# Altium footprint library PcbLib1.PcbLib: 29 footprints (part 1 of 2)
Each footprint in its own frame and in the unit in brackets; x right, y up, seen from the top. Pads: shape width x height; smd on the part's side, far side on the other; paste and mask are expansions set on the pad; w line width, h text height; cw(c..) or ccw(c..) is an arc to the next point about the centre after c.
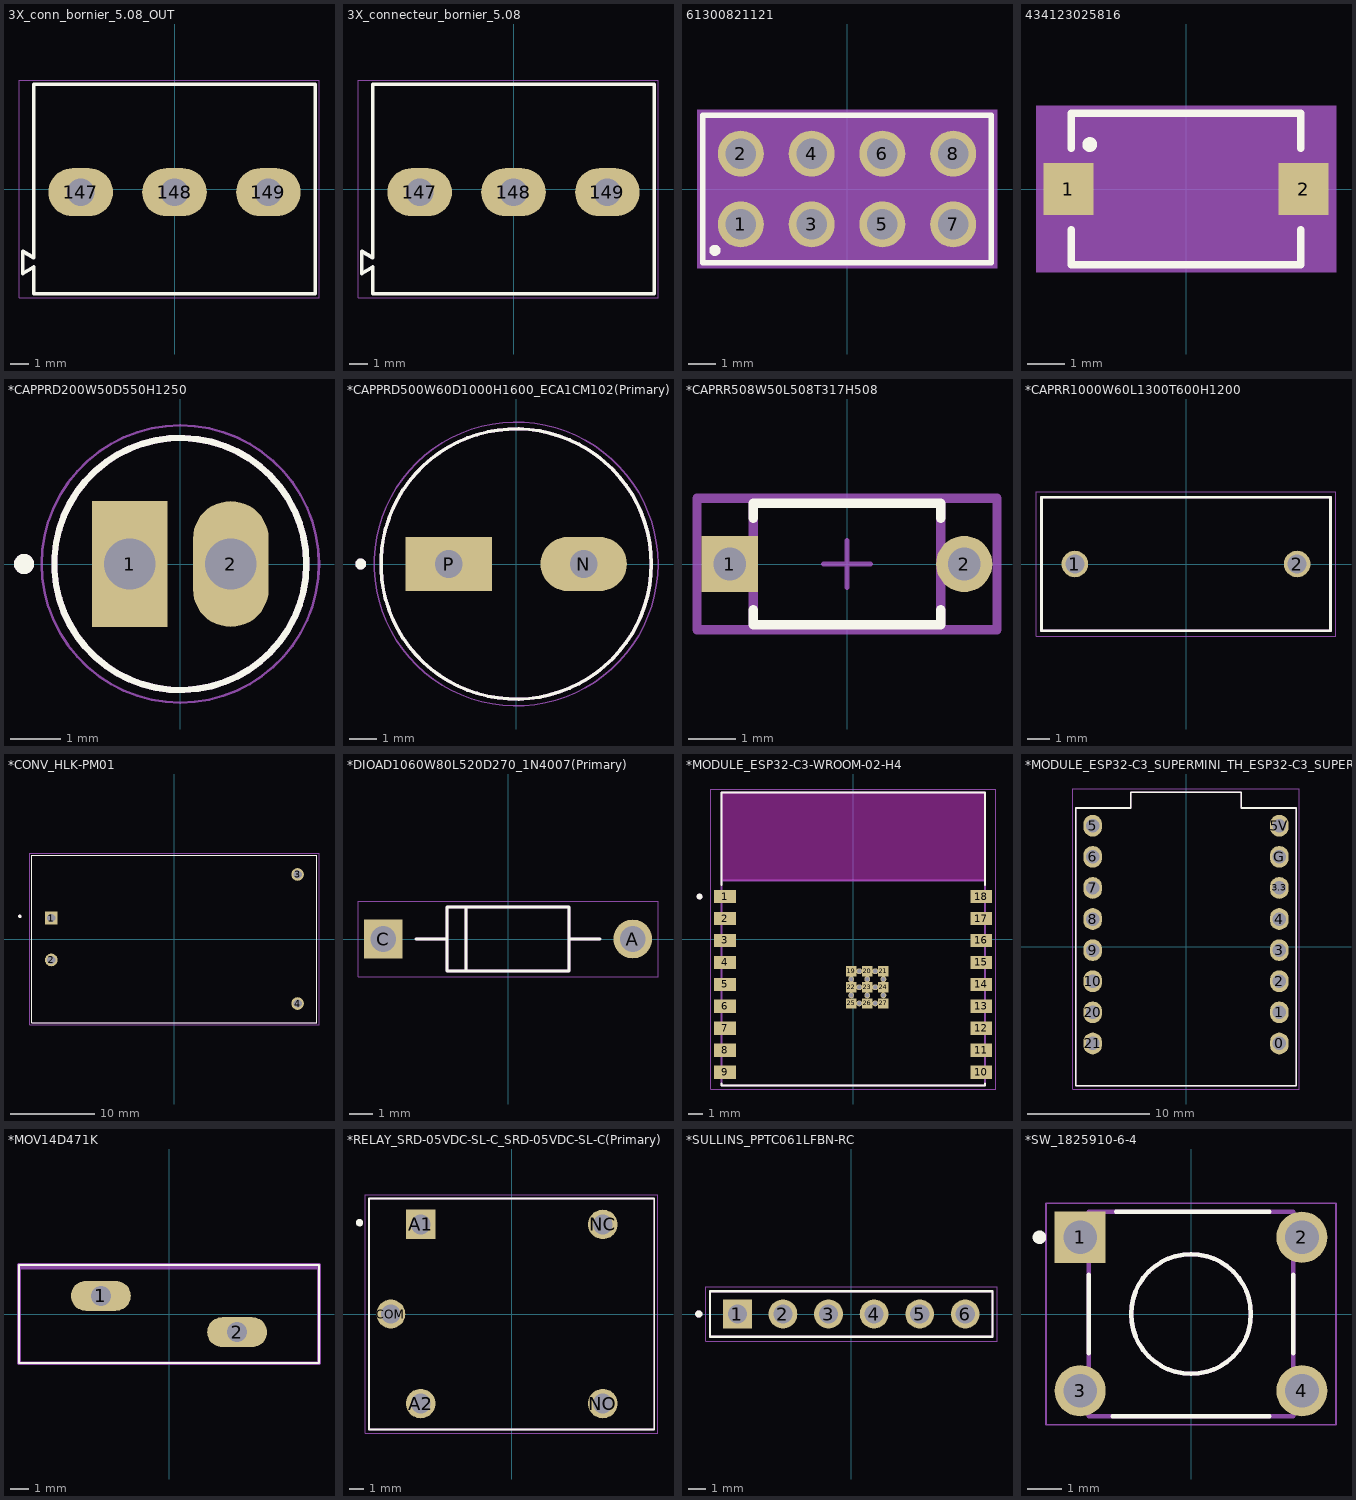
[diagram p0: the footprints below, top view; thin cyan lines are the x and y axes]

## 3X_conn_bornier_5.08_OUT [mm] "Horizontal Cable Entry with Rising Cage Clamp, pitch 5.08mm, 03p"
height 18
pads (3):
  oval 3.5x2.6 hole 1.5: 147(-5.08,-0.175) 148(0,-0.175) 149(5.08,-0.175)
Top Overlay:
  lines w0.2: -7.621,-4.223 -8.22,-4.575 -8.22,-3.375 -7.621,-3.727 ; -7.62,-4.225 -7.62,-5.675 7.62,-5.675 7.62,5.675 -7.62,5.675 -7.62,-3.726
Top Component Center:
  lines w0.1: -0.5,0 0.5,0 ; 0,-0.5 0,0.5
Top Assembly:
  lines w0.1: -7.621,-4.223 -8.22,-4.575 -8.22,-3.375 -7.621,-3.727 ; -7.62,-4.225 -7.62,-5.675 7.62,-5.675 7.62,5.675 -7.62,5.675 -7.62,-3.726
Top Designator:
  text ".Designator" at -3.647,-0.357 h1
Top 3D Body:
  lines w0.1: -7.621,-4.223 -8.22,-4.575 -8.22,-3.375 -7.621,-3.727 ; -7.62,-4.225 -7.62,-5.675 7.62,-5.675 7.62,5.675 -7.62,5.675 -7.62,-3.726
Top Courtyard:
  lines w0.05: -8.42,-5.875 -8.42,5.875 7.82,5.875 7.82,-5.875 -8.42,-5.875
3D body "691236510003.stp": height 18.1, standoff -3.9, extent -7.92,-6 7.92,5.35

## 3X_connecteur_bornier_5.08 [mm] "Horizontal Cable Entry with Rising Cage Clamp, pitch 5.08mm, 03p"
height 18
pads (3):
  oval 3.5x2.6 hole 1.5: 147(-5.08,-0.175) 148(0,-0.175) 149(5.08,-0.175)
Top Overlay:
  lines w0.2: -7.621,-4.223 -8.22,-4.575 -8.22,-3.375 -7.621,-3.727 ; -7.62,-4.225 -7.62,-5.675 7.62,-5.675 7.62,5.675 -7.62,5.675 -7.62,-3.726
Top Component Center:
  lines w0.1: -0.5,0 0.5,0 ; 0,-0.5 0,0.5
Top Assembly:
  lines w0.1: -7.621,-4.223 -8.22,-4.575 -8.22,-3.375 -7.621,-3.727 ; -7.62,-4.225 -7.62,-5.675 7.62,-5.675 7.62,5.675 -7.62,5.675 -7.62,-3.726
Top Designator:
  text ".Designator" at -3.647,-0.357 h1
Top 3D Body:
  lines w0.1: -7.621,-4.223 -8.22,-4.575 -8.22,-3.375 -7.621,-3.727 ; -7.62,-4.225 -7.62,-5.675 7.62,-5.675 7.62,5.675 -7.62,5.675 -7.62,-3.726
Top Courtyard:
  lines w0.05: -8.42,-5.875 7.82,-5.875 7.82,5.875 -8.42,5.875 -8.42,-5.875
3D body "691236510003.stp": height 18.1, standoff -3.9, extent -8.22,-5.675 7.62,5.675

## 61300821121 [mm]
pads (8):
  round 1.65 hole 1.1: 1(-3.81,-1.27) 2(-3.81,1.27) 3(-1.27,-1.27) 4(-1.27,1.27) 5(1.27,-1.27) 6(1.27,1.27) 7(3.81,-1.27) 8(3.81,1.27)
Top Overlay:
  circle w0.2: c-4.74,-2.2 r0.1
  lines w0.2: -5.18,-2.64 5.18,-2.64 5.18,2.64 -5.18,2.64 -5.18,-2.64
Top 3D Body:
  lines w0.1: -5.08,-2.54 5.08,-2.54 5.08,2.54 -5.08,2.54 -5.08,-2.54
Top Courtyard:
  region: 5.38,-2.84 -5.38,-2.84 -5.38,2.84 5.38,2.84
3D body "step_temp.STEP": height 8.54, standoff -3, extent -4.953,-2.54 5.207,2.54

## 434123025816 [mm]
pads (2):
  rect 1.35x1.4 smd paste+0 mask+0.102: 1(-3.175,0) 2(3.175,0)
Top Overlay:
  circle w0.2: c-2.6,1.2 r0.1
  lines w0.2: -3.1,-1.1 -3.1,-2.05 3.1,-2.05 3.1,-1.1 ; -3.1,1.1 -3.1,2.05 3.1,2.05 3.1,1.1
Top 3D Body:
  lines w0.1: -3,-1.95 -3,1.95 3,1.95 3,-1.95 -3,-1.95
Top Courtyard:
  region: 4.05,-2.25 -4.05,-2.25 -4.05,2.25 4.05,2.25
3D body "step_temp.STEP": height 2.5, standoff 0, extent -3.5,-1.95 3.5,1.95

## *CAPPRD200W50D550H1250 [mm]
pads (2):
  rect 1.5x2.5 hole 1.02: 1(-1,0)
  oval 1.5x2.5 hole 1.02: 2(1,0)
Top Overlay:
  circle w0.2: c-3.1,0 r0.1
  circle w0.127: c0,0 r2.5
Mechanical 4:
  circle w0.2: c-3.1,0 r0.1
  circle w0.127: c0,0 r2.5
  circle w0.2: c-3.1,0 r0.1
  circle w0.127: c0,0 r2.5
Mechanical 16:
  circle w0.05: c0,0 r2.75
3D body "UVR1E100MDD.STEP": height 12.5, standoff -19, extent -2.5,-2.499 2.5,2.5

## *CAPPRD500W60D1000H1600_ECA1CM102(Primary) [mm]
pads (2):
  oval 3.2x2 hole 1.02: N(2.5,0)
  rect 3.2x2 hole 1.02: P(-2.5,0)
Top Overlay:
  circle w0.2: c-5.75,0 r0.1
  circle w0.127: c0,0 r5
Mechanical 4:
  circle w0.2: c-5.75,0 r0.1
  circle w0.127: c0,0 r5
  circle w0.2: c-5.75,0 r0.1
  circle w0.127: c0,0 r5
Mechanical 16:
  circle w0.05: c0,0 r5.25
3D body "ECA1CM102.STEP": height 16, standoff -17, extent -5,-4.999 5,4.999

## *CAPRR508W50L508T317H508 [mm]
pads (2):
  rect 1.2x1.2 hole 0.7 paste-2539.97 mask+0: 1(-2.5,0)
  round 1.2 hole 0.7 paste-2539.97 mask+0: 2(2.5,0)
Top Overlay:
  lines w0.2: -2,-0.975 -2,-1.3 2,-1.3 2,-0.975 ; -2,0.975 -2,1.3 2,1.3 2,0.975
Top Component Center:
  lines w0.1: -0.5,0 0.5,0 ; 0,-0.5 0,0.5
Top Assembly:
  lines w0.2: -3.2,-1.4 -3.2,1.4 3.2,1.4 3.2,-1.4 -3.2,-1.4
  text ".Designator" at 0,0.188 h1
Top 3D Body:
  lines w0.2: -2,-1.3 -2,1.3 2,1.3 2,-1.3 -2,-1.3
Top Courtyard:
  lines w0.2: -3.2,-1.4 -3.2,1.4 3.2,1.4 3.2,-1.4 -3.2,-1.4
3D body "Cap_Vishay_K104K15X7RF53H5_eec.STEP": height 0.25, standoff 0, extent -3.2,-1.4 3.2,1.4

## *CAPRR1000W60L1300T600H1200 [mm]
pads (2):
  round 1.2 hole 0.85: 1(-5,0) 2(5,0)
Top Overlay:
  lines w0.127: -6.5,-3 -6.5,3 6.5,3 6.5,-3 -6.5,-3
Mechanical 4:
  lines w0.127: -6.5,-3 6.5,-3 ; -6.5,-3 -6.5,3 ; -6.5,-3 6.5,-3 ; -6.5,-3 -6.5,3 ; -6.5,3 6.5,3 ; -6.5,3 6.5,3 ; 6.5,-3 6.5,3 ; 6.5,-3 6.5,3
Mechanical 16:
  lines w0.05: -6.75,-3.25 6.75,-3.25 6.75,3.25 -6.75,3.25 -6.75,-3.25
3D body "B32921C3104M189--3DModel-STEP-56544.STEP": height 12, standoff -4, extent -6.461,-3.132 6.539,2.868

## *CONV_HLK-PM01 [mm]
pads (4):
  rect 1.508x1.508 hole 1: 1(-14.7,2.5)
  round 1.508 hole 1: 2(-14.7,-2.5) 3(14.7,7.7) 4(14.7,-7.7)
Top Overlay:
  circle w0.2: c-18.45,2.7 r0.1
  lines w0.127: -17,-10 -17,10 17,10 17,-10 -17,-10
Mechanical 4:
  circle w0.2: c-18.45,2.7 r0.1
  circle w0.2: c-18.45,2.7 r0.1
  lines w0.127: -17,-10 -17,10 ; -17,-10 17,-10 ; -17,-10 -17,10 ; -17,-10 17,-10 ; -17,10 17,10 ; -17,10 17,10 ; 17,-10 17,10 ; 17,-10 17,10
Mechanical 16:
  lines w0.05: -17.25,-10.25 -17.25,10.25 17.25,10.25 17.25,-10.25 -17.25,-10.25
3D body "HLK-PM01.STEP": height 15, standoff -5, extent -17,-10.1 17,10.1

## *DIOAD1060W80L520D270_1N4007(Primary) [mm]
pads (2):
  round 1.65 hole 1.1: A(5.3,0)
  rect 1.65x1.65 hole 1.1: C(-5.3,0)
Top Overlay:
  lines w0.127: -3.9,0 -2.6,0 ; 3.9,0 2.6,0 ; -2.6,0 -2.6,-1.35 -1.775,-1.35 ; -2.6,0 -2.6,1.35 -1.775,1.35 ; -1.775,-1.35 -1.775,1.35 ; -1.775,-1.35 2.6,-1.35 2.6,0 ; -1.775,1.35 2.6,1.35 2.6,0
Mechanical 4:
  lines w0.127: -2.6,-1.35 -2.6,0 ; -2.6,-1.35 -1.775,-1.35 ; -2.6,-1.35 -2.6,0 ; -2.6,-1.35 -1.775,-1.35 ; -2.6,0 -3.9,0 -2.6,0 ; -2.6,0 -2.6,1.35 ; -2.6,0 -2.6,1.35 ; -2.6,1.35 -1.775,1.35 ; -2.6,1.35 -1.775,1.35 ; -1.775,-1.35 -1.775,1.35 ; -1.775,-1.35 2.6,-1.35 ; -1.775,-1.35 -1.775,1.35 ; -1.775,-1.35 2.6,-1.35 ; -1.775,1.35 2.6,1.35 ; -1.775,1.35 2.6,1.35 ; 2.6,-1.35 2.6,0 ; 2.6,-1.35 2.6,0 ; 2.6,0 3.9,0 2.6,0 ; 2.6,0 2.6,1.35 ; 2.6,0 2.6,1.35
Mechanical 16:
  lines w0.05: -6.375,-1.6 -6.375,1.6 6.375,1.6 6.375,-1.6 -6.375,-1.6

## *MODULE_ESP32-C3-WROOM-02-H4 [mm]
pads (39):
  rect 1.5x0.9 smd: 1(-8.75,2.9) 2(-8.75,1.4) 3(-8.75,-0.1) 4(-8.75,-1.6) 5(-8.75,-3.1) 6(-8.75,-4.6) 7(-8.75,-6.1) 8(-8.75,-7.6) 9(-8.75,-9.1) 10(8.75,-9.1) 11(8.75,-7.6) 12(8.75,-6.1) 13(8.75,-4.6) 14(8.75,-3.1) 15(8.75,-1.6) 16(8.75,-0.1) 17(8.75,1.4) 18(8.75,2.9)
  rect 0.7x0.7 smd: 19(-0.14,-2.2) 20(0.96,-2.2) 21(2.06,-2.2) 22(-0.14,-3.3) 23(0.96,-3.3) 24(2.06,-3.3) 25(-0.14,-4.4) 26(0.96,-4.4) 27(2.06,-4.4)
  round 0.4 hole 0.3: 28(0.41,-2.2) 29(1.51,-2.2) 30(-0.14,-2.75) 31(0.96,-2.75) 32(2.06,-2.75) 33(0.41,-3.3) 34(1.51,-3.3) 35(-0.14,-3.85) 36(0.96,-3.85) 37(2.06,-3.85) 38(0.41,-4.4) 39(1.51,-4.4)
Top Overlay:
  circle w0.2: c-10.5,2.9 r0.1
  lines w0.127: -9,-9.87 -9,-10 9,-10 9,-9.87 ; -9,3.67 -9,10 9,10 9,3.67
Keep-Out Layer:
  region: -9,10 9,10 9,4 -9,4
  region: -9,10 9,10 9,4 -9,4
  region: -9,10 9,10 9,4 -9,4
  region: -9,10 9,10 9,4 -9,4
  region: -9,10 9,10 9,4 -9,4
  region: -9,10 9,10 9,4 -9,4
  region: -9,10 9,10 9,4 -9,4
  region: -9,10 9,10 9,4 -9,4
  region: -9,10 9,10 9,4 -9,4
Mechanical 4:
  circle w0.2: c-10.5,2.9 r0.1
  circle w0.2: c-10.5,2.9 r0.1
  lines w0.127: -9,-10 -9,4 ; -9,-10 9,-10 ; -9,-10 -9,4 ; -9,-10 9,-10 ; -9,4 -9,10 ; -9,4 9,4 ; -9,4 -9,10 ; -9,4 9,4 ; -9,10 9,10 ; -9,10 9,10 ; 9,-10 9,4 ; 9,-10 9,4 ; 9,4 9,10 ; 9,4 9,10
Mechanical 16:
  lines w0.05: -9.75,-10.25 -9.75,10.25 9.75,10.25 9.75,-10.25 -9.75,-10.25
3D body "ESP32-C3-WROOM-02-N4--3DModel-STEP-269445 (1).STEP": height 3.35, standoff 0, extent -9.127,-10 8.873,10

## *MODULE_ESP32-C3_SUPERMINI_TH_ESP32-C3_SUPERMINI_TH(Primary) [mm]
pads (16):
  oval 1.524x1.778 hole 1.1: 0(7.62,-7.88) 1(7.62,-5.34) 2(7.62,-2.8) 3(7.62,-0.26) 3.3(7.62,4.82) 4(7.62,2.28) 5(-7.62,9.9) 5V(7.62,9.9) 6(-7.62,7.36) 7(-7.62,4.82) 8(-7.62,2.28) 9(-7.62,-0.26) 10(-7.62,-2.8) 20(-7.62,-5.34) 21(-7.62,-7.88) G(7.62,7.36)
Top Overlay:
  lines w0.127: -9,-11.35 -9,11.35 -4.5,11.35 -4.5,12.65 4.5,12.65 4.5,11.35 9,11.35 9,-11.35 -9,-11.35
Mechanical 4:
  lines w0.127: -9,-11.35 -9,11.35 ; -9,-11.35 9,-11.35 ; -9,-11.35 -9,11.35 ; -9,-11.35 9,-11.35 ; -9,11.35 -4.5,11.35 ; -9,11.35 -4.5,11.35 ; -4.5,11.35 -4.5,12.65 ; -4.5,11.35 -4.5,12.65 ; -4.5,12.65 4.5,12.65 ; -4.5,12.65 4.5,12.65 ; 4.5,11.35 4.5,12.65 ; 4.5,11.35 9,11.35 ; 4.5,11.35 4.5,12.65 ; 4.5,11.35 9,11.35 ; 9,-11.35 9,11.35 ; 9,-11.35 9,11.35
Mechanical 16:
  lines w0.05: -9.25,-11.6 -9.25,12.9 9.25,12.9 9.25,-11.6 -9.25,-11.6
3D body "0022284081.SLDPRT": height 11.81, standoff -1.65, extent -8.865,-9.144 -6.375,11.176
3D body "ESP32-C3 SuperMini_TH--3DModel-STEP-56544.STEP": height 13.05, standoff 8.89, extent -9,-11.35 9,12.65
3D body "0022284081.SLDPRT": height 11.81, standoff -1.65, extent 6.401,-9.144 8.89,11.176

## *MOV14D471K [mm]
pads (2):
  oval 3.3x1.65 hole 1.1: 1(-3.75,1) 2(3.75,-1)
Top Overlay:
  lines w0.1: -8.25,-2.7 -8.25,2.7 8.25,2.7 8.25,-2.7 -8.25,-2.7
Mechanical 4:
  lines w0.2: -8.25,-2.7 -8.25,2.54 8.25,2.54 8.25,-2.7 ; -8.25,-2.7 8.25,-2.7 ; -8.25,-2.7 -8.25,2.7 8.25,2.7 8.25,-2.7 ; -8.25,-2.7 8.25,-2.7
3D body "mov-14d471k.SLDPRT": height 20.95, standoff -19.05, extent -8.3,-2.7 8.2,2.7

## *RELAY_SRD-05VDC-SL-C_SRD-05VDC-SL-C(Primary) [mm]
pads (5):
  rect 1.98x1.98 hole 1.32: A1(-6.1,6)
  round 1.98 hole 1.32: A2(-6.1,-6) NC(6.1,6) NO(6.1,-6)
  round 1.935 hole 1.29: COM(-8.1,0)
Top Overlay:
  circle w0.3: c-10.2,6.119 r0.1
  lines w0.127: -9.55,-7.75 -9.55,7.75 9.55,7.75 9.55,-7.75 -9.55,-7.75
Mechanical 4:
  lines w0.127: -9.55,-7.75 -9.55,7.75 ; -9.55,-7.75 9.55,-7.75 ; -9.55,-7.75 -9.55,7.75 ; -9.55,-7.75 9.55,-7.75 ; -9.55,7.75 9.55,7.75 ; -9.55,7.75 9.55,7.75 ; 9.55,-7.75 9.55,7.75 ; 9.55,-7.75 9.55,7.75
Mechanical 16:
  lines w0.05: -9.8,-8 -9.8,8 9.8,8 9.8,-8 -9.8,-8
3D body "SRD-05VDC-SL-C.STEP": height 15.8, standoff -3, extent -9.6,-7.8 9.6,7.8

## *SULLINS_PPTC061LFBN-RC [mm]
pads (6):
  rect 1.605x1.605 hole 1.07: 1(-6.35,0)
  round 1.605 hole 1.07: 2(-3.81,0) 3(-1.27,0) 4(1.27,0) 5(3.81,0) 6(6.35,0)
Top Overlay:
  circle w0.2: c-8.5,0 r0.1
  lines w0.127: -7.87,-1.27 7.87,-1.27 7.87,1.27 -7.87,1.27 -7.87,-1.27
Mechanical 4:
  circle w0.2: c-8.5,0 r0.1
  circle w0.2: c-8.5,0 r0.1
  lines w0.127: -7.87,-1.27 7.87,-1.27 ; -7.87,-1.27 -7.87,1.27 ; -7.87,-1.27 7.87,-1.27 ; -7.87,-1.27 -7.87,1.27 ; -7.87,1.27 7.87,1.27 ; -7.87,1.27 7.87,1.27 ; 7.87,-1.27 7.87,1.27 ; 7.87,-1.27 7.87,1.27
Mechanical 16:
  lines w0.05: -8.12,-1.52 8.12,-1.52 8.12,1.52 -8.12,1.52 -8.12,-1.52
3D body "PPTC061LFBNRC--3DModel-STEP-269445.STEP": height 8.51, standoff -3.2, extent -7.874,-1.27 7.874,1.27

## *SW_1825910-6-4 [mm]
pads (4):
  rect 1.498x1.498 hole 0.99: 1(-3.25,2.25)
  round 1.498 hole 0.99: 2(3.25,2.25) 3(-3.25,-2.25) 4(3.25,-2.25)
Top Overlay:
  circle w0.127: c0,0 r1.755
  circle w0.2: c-4.445,2.25 r0.1
  lines w0.127: -2.995,-1.15 -2.995,1.15 ; -2.3,-2.995 2.3,-2.995 ; -2.2,2.995 2.3,2.995 ; 3,-1.15 3,1.15
Mechanical 4:
  circle w0.127: c0,0 r1.755
  circle w0.127: c0,0 r1.755
  lines w0.127: -2.995,-2.995 -2.995,2.995 ; -2.995,-2.995 2.995,-2.995 ; -2.995,-2.995 -2.995,2.995 ; -2.995,-2.995 2.995,-2.995 ; -2.995,2.995 2.995,2.995 ; -2.995,2.995 2.995,2.995 ; 2.995,-2.995 2.995,2.995 ; 2.995,-2.995 2.995,2.995
Mechanical 16:
  lines w0.05: -4.25,-3.25 -4.25,3.25 4.25,3.25 4.25,-3.25 -4.25,-3.25
3D body "1825910-6.SLDPRT": height 7.62, standoff -0.89, extent -3.9,-2.995 3.9,2.995